# Altium schematic symbol library Adafruit_MiniBoost.SchLib: 1 symbol
Pins are listed as number, name and electrical type; pins without a type are passive.

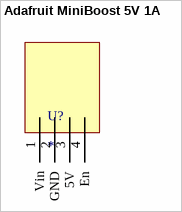
[diagram p0: symbol Adafruit MiniBoost 5V 1A]

## Adafruit MiniBoost 5V 1A
designator U?
footprint PCBComponent_1
pins: 1 Vin, 2 GND, 3 5V, 4 En